# Altium footprint library PCB_V2.PcbLib: 86 footprints (part 5 of 6)
Each footprint in its own frame and in the unit in brackets; x right, y up, seen from the top. Pads: shape width x height; smd on the part's side, far side on the other; paste and mask are expansions set on the pad; w line width, h text height; cw(c..) or ccw(c..) is an arc to the next point about the centre after c.
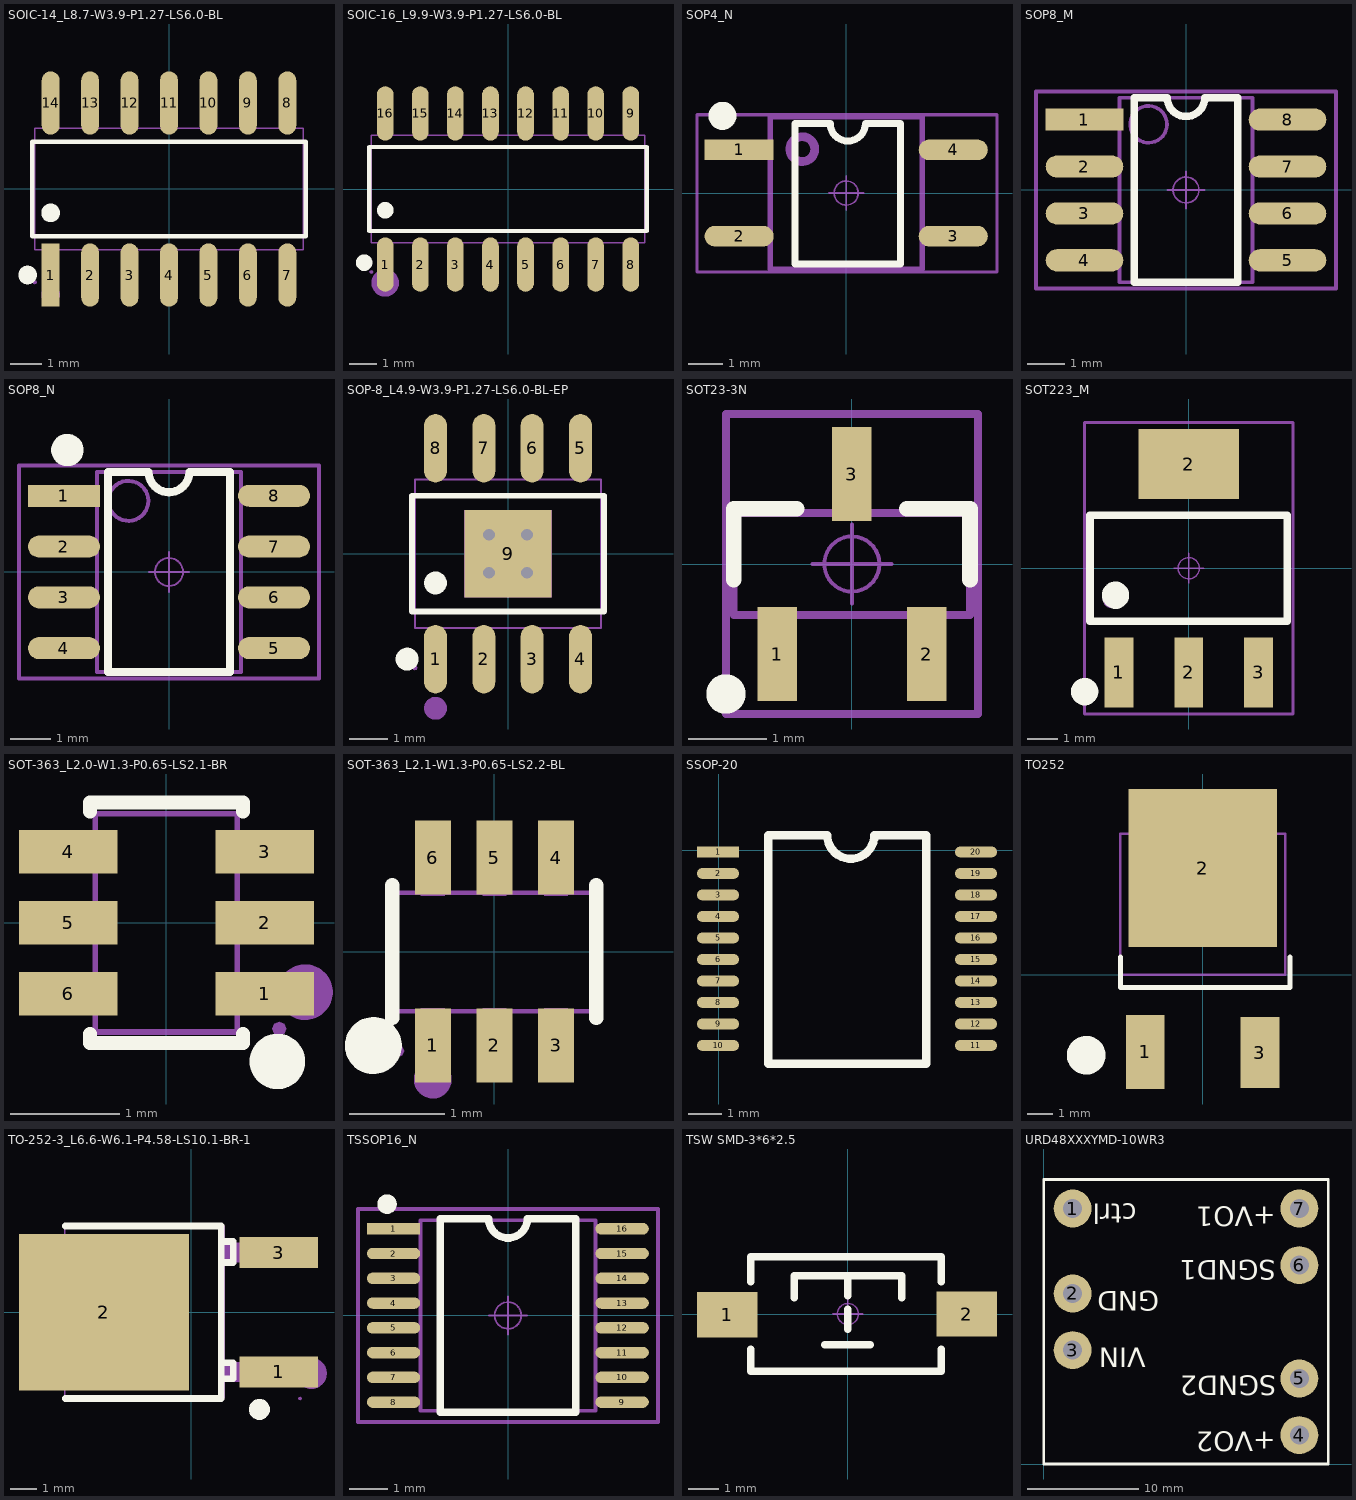
[diagram p4: the footprints below, top view; thin cyan lines are the x and y axes]

## SOIC-14_L8.7-W3.9-P1.27-LS6.0-BL [mm]
pads (14):
  rect 0.574x2.038 smd: 1(-3.81,-2.769)
  oval 0.574x2.038 smd: 2(-2.54,-2.769) 3(-1.27,-2.769) 4(0,-2.769) 5(1.27,-2.769) 6(2.54,-2.769) 7(3.81,-2.769) 8(3.81,2.769) 9(2.54,2.769) 10(1.27,2.769) 11(0,2.769) 12(-1.27,2.769) 13(-2.54,2.769) 14(-3.81,2.769)
Top Overlay:
  circle w0.3: c-3.81,-0.769 r0.15
  circle w0.3: c-4.549,-2.769 r0.15
  lines w0.152: -4.401,-1.521 -4.401,1.521 4.401,1.521 4.401,-1.521 -4.401,-1.521
Mechanical 6:
  circle w0.3: c-3.81,-3.4 r0.15
Mechanical 15:
  region: -4.261,-3 -4.279,-2.955 -4.325,-2.936 -4.371,-2.955 -4.389,-3 -4.371,-3.045 -4.325,-3.064 -4.279,-3.045
  region: -4.015,-3 -4.015,-2.165 -3.605,-2.165 -3.605,-3
  region: -4.015,-2.175 -4.015,-1.94 -3.605,-1.94 -3.605,-2.175
  region: -2.745,-3 -2.745,-2.165 -2.335,-2.165 -2.335,-3
  region: -2.745,-2.175 -2.745,-1.94 -2.335,-1.94 -2.335,-2.175
  region: -1.475,-3 -1.475,-2.165 -1.065,-2.165 -1.065,-3
  region: -1.475,-2.175 -1.475,-1.94 -1.065,-1.94 -1.065,-2.175
  region: -0.205,-3 -0.205,-2.165 0.205,-2.165 0.205,-3
  region: -0.205,-2.175 -0.205,-1.94 0.205,-1.94 0.205,-2.175
  region: 1.065,-3 1.065,-2.165 1.475,-2.165 1.475,-3
  region: 1.065,-2.175 1.065,-1.94 1.475,-1.94 1.475,-2.175
  region: 2.335,-3 2.335,-2.165 2.745,-2.165 2.745,-3
  region: 2.335,-2.175 2.335,-1.94 2.745,-1.94 2.745,-2.175
  region: 3.605,-3 3.605,-2.165 4.015,-2.165 4.015,-3
  region: 3.605,-2.175 3.605,-1.94 4.015,-1.94 4.015,-2.175
  region: -4.015,3 -4.015,2.165 -3.605,2.165 -3.605,3
  region: -4.015,2.175 -4.015,1.94 -3.605,1.94 -3.605,2.175
  region: -2.745,3 -2.745,2.165 -2.335,2.165 -2.335,3
  region: -2.745,2.175 -2.745,1.94 -2.335,1.94 -2.335,2.175
  region: -1.475,3 -1.475,2.165 -1.065,2.165 -1.065,3
  region: -1.475,2.175 -1.475,1.94 -1.065,1.94 -1.065,2.175
  region: -0.205,3 -0.205,2.165 0.205,2.165 0.205,3
  region: -0.205,2.175 -0.205,1.94 0.205,1.94 0.205,2.175
  region: 1.065,3 1.065,2.165 1.475,2.165 1.475,3
  region: 1.065,2.175 1.065,1.94 1.475,1.94 1.475,2.175
  region: 2.335,3 2.335,2.165 2.745,2.165 2.745,3
  region: 2.335,2.175 2.335,1.94 2.745,1.94 2.745,2.175
  region: 3.605,3 3.605,2.165 4.015,2.165 4.015,3
  region: 3.605,2.175 3.605,1.94 4.015,1.94 4.015,2.175
  lines w0.051: -4.325,-1.95 -4.325,1.95 4.325,1.95 4.325,-1.95 -4.325,-1.95

## SOIC-16_L9.9-W3.9-P1.27-LS6.0-BL [mm]
pads (16):
  oval 0.602x1.971 smd: 1(-4.445,-2.736) 2(-3.175,-2.736) 3(-1.905,-2.736) 4(-0.635,-2.736) 5(0.635,-2.736) 6(1.905,-2.736) 7(3.175,-2.736) 8(4.445,-2.736) 9(4.445,2.736) 10(3.175,2.736) 11(1.905,2.736) 12(0.635,2.736) 13(-0.635,2.736) 14(-1.905,2.736) 15(-3.175,2.736) 16(-4.445,2.736)
Top Overlay:
  circle w0.3: c-5.207,-2.667 r0.15
  circle w0.3: c-4.445,-0.769 r0.15
  lines w0.152: -5.026,-1.521 5.026,-1.521 5.026,1.521 -5.026,1.521 -5.026,-1.521
Mechanical 6:
  circle w0.5: c-4.445,-3.4 r0.25
Mechanical 15:
  region: 4.23,2.31 4.23,1.94 4.66,1.94 4.66,2.31
  region: 4.23,3 4.23,2.3 4.66,2.3 4.66,3
  region: 2.96,2.31 2.96,1.94 3.39,1.94 3.39,2.31
  region: 2.96,3 2.96,2.3 3.39,2.3 3.39,3
  region: 1.69,2.31 1.69,1.94 2.12,1.94 2.12,2.31
  region: 1.69,3 1.69,2.3 2.12,2.3 2.12,3
  region: 0.42,2.31 0.42,1.94 0.85,1.94 0.85,2.31
  region: 0.42,3 0.42,2.3 0.85,2.3 0.85,3
  region: -0.85,2.31 -0.85,1.94 -0.42,1.94 -0.42,2.31
  region: -0.85,3 -0.85,2.3 -0.42,2.3 -0.42,3
  region: -2.12,2.31 -2.12,1.94 -1.69,1.94 -1.69,2.31
  region: -2.12,3 -2.12,2.3 -1.69,2.3 -1.69,3
  region: -3.39,2.31 -3.39,1.94 -2.96,1.94 -2.96,2.31
  region: -3.39,3 -3.39,2.3 -2.96,2.3 -2.96,3
  region: -4.66,2.31 -4.66,1.94 -4.23,1.94 -4.23,2.31
  region: -4.66,3 -4.66,2.3 -4.23,2.3 -4.23,3
  region: 4.23,-2.31 4.23,-1.94 4.66,-1.94 4.66,-2.31
  region: 4.23,-3 4.23,-2.3 4.66,-2.3 4.66,-3
  region: 2.96,-2.31 2.96,-1.94 3.39,-1.94 3.39,-2.31
  region: 2.96,-3 2.96,-2.3 3.39,-2.3 3.39,-3
  region: 1.69,-2.31 1.69,-1.94 2.12,-1.94 2.12,-2.31
  region: 1.69,-3 1.69,-2.3 2.12,-2.3 2.12,-3
  region: 0.42,-2.31 0.42,-1.94 0.85,-1.94 0.85,-2.31
  region: 0.42,-3 0.42,-2.3 0.85,-2.3 0.85,-3
  region: -0.85,-2.31 -0.85,-1.94 -0.42,-1.94 -0.42,-2.31
  region: -0.85,-3 -0.85,-2.3 -0.42,-2.3 -0.42,-3
  region: -2.12,-2.31 -2.12,-1.94 -1.69,-1.94 -1.69,-2.31
  region: -2.12,-3 -2.12,-2.3 -1.69,-2.3 -1.69,-3
  region: -3.39,-2.31 -3.39,-1.94 -2.96,-1.94 -2.96,-2.31
  region: -3.39,-3 -3.39,-2.3 -2.96,-2.3 -2.96,-3
  region: -4.66,-2.31 -4.66,-1.94 -4.23,-1.94 -4.23,-2.31
  region: -4.66,-3 -4.66,-2.3 -4.23,-2.3 -4.23,-3
  region: -4.886,-3 -4.904,-2.955 -4.95,-2.936 -4.996,-2.955 -5.014,-3 -4.996,-3.045 -4.95,-3.064 -4.904,-3.045
  lines w0.051: -4.95,-1.95 4.95,-1.95 4.95,1.95 -4.95,1.95 -4.95,-1.95

## SOP4_N [mm] "4.4*6.8*2.1"
pads (4):
  rect 2x0.6 smd: 1(-3.1,1.25)
  oval 2x0.6 smd: 2(-3.1,-1.25) 3(3.1,-1.25) 4(3.1,1.25)
Top Overlay:
  circle w0.5: c-3.581,2.235 r0.155
  lines w0.2: -1.476,2.012 -1.476,-2.052 1.572,-2.052 1.572,2.012
  lines w0.203: -1.476,2.012 -0.46,2.012 ccw(c0.048,2.012) 0.048,1.504 ccw(c0.048,2.012) 0.556,2.012 1.572,2.012
Mechanical 13:
  circle w0.254: c-1.27,1.27 r0.359
  lines w0.15: -2.2,-2.2 -2.2,2.2 2.2,2.2 2.2,-2.2 -2.2,-2.2
Mechanical 15:
  circle w0.05: c0,0 r0.35
  lines w0.05: -0.5,0 0.5,0 ; 0,-0.5 0,0.5
  lines w0.1: -4.318,-2.286 -4.318,2.266 4.366,2.266 4.366,-2.286 -4.318,-2.286
3D body: height 1.9, standoff 0, extent -3.403,-2.15 3.403,2.15

## SOP8_M [mm] "5*6*1.8mm（?"
height 1.75
pads (8):
  rect 2.1x0.6 smd: 1(-2.75,1.905)
  oval 2.1x0.6 smd: 2(-2.75,0.635) 3(-2.75,-0.635) 4(-2.75,-1.905) 5(2.75,-1.905) 6(2.75,-0.635) 7(2.75,0.635) 8(2.75,1.905)
Top Overlay:
  lines w0.2: -1.397,2.5 -1.397,-2.5 1.397,-2.5 1.397,2.5
  lines w0.203: -1.397,2.5 -0.508,2.5 ccw(c0,2.5) 0,1.992 ccw(c0,2.5) 0.508,2.5 1.397,2.5
Mechanical 13:
  circle w0.1: c-1.016,1.778 r0.5
  lines w0.1: -1.8,-2.5 -1.8,2.5 1.8,2.5 1.8,-2.5 -1.8,-2.5
Mechanical 15:
  circle w0.05: c0,0 r0.35
  lines w0.05: -0.5,0 0.5,0 ; 0,-0.5 0,0.5
  lines w0.1: -4.064,-2.667 -4.064,2.667 4.064,2.667 4.064,-2.667 -4.064,-2.667
3D body: height 1.9, standoff 0, extent -3.003,-2.5 3.003,2.5

## SOP8_N [mm] "5*6*1"
height 1.75
pads (8):
  rect 1.8x0.55 smd: 1(-2.625,1.905)
  oval 1.8x0.55 smd: 2(-2.625,0.635) 3(-2.625,-0.635) 4(-2.625,-1.905) 5(2.625,-1.905) 6(2.625,-0.635) 7(2.625,0.635) 8(2.625,1.905)
Top Overlay:
  circle w0.5: c-2.54,3.048 r0.155
  lines w0.2: -1.524,2.5 -1.524,-2.5 1.524,-2.5 1.524,2.5
  lines w0.203: -1.524,2.5 -0.508,2.5 ccw(c0,2.5) 0,1.992 ccw(c0,2.5) 0.508,2.5 1.524,2.5
Mechanical 13:
  circle w0.1: c-1.016,1.778 r0.5
  lines w0.1: -1.8,-2.5 1.8,-2.5 1.8,2.5 -1.8,2.5 -1.8,-2.5
Mechanical 15:
  circle w0.05: c0,0 r0.35
  lines w0.05: -0.5,0 0.5,0 ; 0,-0.5 0,0.5
  lines w0.1: -3.75,-2.667 -3.75,2.667 3.75,2.667 3.75,-2.667 -3.75,-2.667
3D body: height 1.9, standoff 0, extent -3.003,-2.5 3.003,2.5

## SOP-8_L4.9-W3.9-P1.27-LS6.0-BL-EP [mm]
pads (9):
  oval 0.6x1.8 smd: 1(-1.905,-2.772) 2(-0.635,-2.772) 3(0.635,-2.772) 4(1.905,-2.772) 5(1.905,2.772) 6(0.635,2.772) 7(-0.635,2.772) 8(-1.905,2.772)
  rect 2.29x2.29 smd: 9(0,0)
via 0.5,0.5 diameter 0.61 hole 0.305
via 0.5,-0.5 diameter 0.61 hole 0.305
via -0.5,-0.5 diameter 0.61 hole 0.305
via -0.5,0.5 diameter 0.61 hole 0.305
Top Overlay:
  circle w0.3: c-2.652,-2.772 r0.15
  circle w0.3: c-1.905,-0.769 r0.15
  lines w0.152: -2.526,-1.521 2.526,-1.521 2.526,1.521 -2.526,1.521 -2.526,-1.521
Mechanical 6:
  circle w0.3: c-1.905,-4.064 r0.15
Mechanical 15:
  region: -1.145,-1.145 -1.145,1.145 1.145,1.145 1.145,-1.145
  region: 1.695,2.175 1.695,1.94 2.115,1.94 2.115,2.175
  region: 1.695,3 1.695,2.165 2.115,2.165 2.115,3
  region: 0.425,2.175 0.425,1.94 0.845,1.94 0.845,2.175
  region: 0.425,3 0.425,2.165 0.845,2.165 0.845,3
  region: -0.845,2.175 -0.845,1.94 -0.425,1.94 -0.425,2.175
  region: -0.845,3 -0.845,2.165 -0.425,2.165 -0.425,3
  region: -2.115,2.175 -2.115,1.94 -1.695,1.94 -1.695,2.175
  region: -2.115,3 -2.115,2.165 -1.695,2.165 -1.695,3
  region: 1.695,-2.175 1.695,-1.94 2.115,-1.94 2.115,-2.175
  region: 1.695,-3 1.695,-2.165 2.115,-2.165 2.115,-3
  region: 0.425,-2.175 0.425,-1.94 0.845,-1.94 0.845,-2.175
  region: 0.425,-3 0.425,-2.165 0.845,-2.165 0.845,-3
  region: -0.845,-2.175 -0.845,-1.94 -0.425,-1.94 -0.425,-2.175
  region: -0.845,-3 -0.845,-2.165 -0.425,-2.165 -0.425,-3
  region: -2.115,-2.175 -2.115,-1.94 -1.695,-1.94 -1.695,-2.175
  region: -2.115,-3 -2.115,-2.165 -1.695,-2.165 -1.695,-3
  region: -2.386,-3 -2.404,-2.955 -2.45,-2.936 -2.496,-2.955 -2.514,-3 -2.496,-3.045 -2.45,-3.064 -2.404,-3.045
  lines w0.051: -2.45,-1.95 2.45,-1.95 2.45,1.95 -2.45,1.95 -2.45,-1.95

## SOT23-3N [mm] "3x1.3x1"
height 1.1
pads (3):
  rect 0.5x1.2 smd: 1(-0.95,-1.143) 2(0.95,-1.143) 3(0,1.143)
Top Overlay:
  circle w0.25: c-1.6,-1.651 r0.125
  lines w0.2: -1.501,-0.2 -1.501,0.7 -0.701,0.7 ; 0.699,0.7 1.499,0.7 1.499,-0.2
Mechanical 13:
  lines w0.1: -1.5,-0.65 -1.5,0.65 1.5,0.65 1.5,-0.65 -1.5,-0.65
Mechanical 15:
  circle w0.05: c0,0 r0.35
  lines w0.05: -0.5,0 0.5,0 ; 0,-0.5 0,0.5
  lines w0.1: -1.6,-1.905 -1.6,1.905 1.6,1.905 1.6,-1.905 -1.6,-1.905
3D body: height 1.05, standoff 0, extent -1.5,-1.2 1.5,1.2

## SOT223_M [mm] "6.4x7x1.6"
height 1.7
pads (4):
  rect 0.95x2.3 smd: 1(-2.3,-3.429) 2(0,-3.429) 3(2.3,-3.429)
  rect 3.3x2.3 smd: 2(0,3.429)
Top Overlay:
  circle w0.5: c-2.413,-0.889 r0.2
  circle w0.5: c-3.429,-4.064 r0.2
  lines w0.25: -3.25,-1.75 -3.25,1.75 3.25,1.75 3.25,-1.75 -3.25,-1.75
Mechanical 13:
  circle w0.1: c-2.536,-1.016 r0.25
  lines w0.1: -3.25,-1.75 3.25,-1.75 3.25,1.75 -3.25,1.75 -3.25,-1.75
Mechanical 15:
  circle w0.05: c0,0 r0.35
  lines w0.05: -0.5,0 0.5,0 ; 0,-0.5 0,0.5
  lines w0.1: -3.429,-4.8 3.429,-4.8 3.429,4.8 -3.429,4.8 -3.429,-4.8
3D body: height 1.65, standoff -0.02, extent -3.25,-3.508 3.25,3.508

## SOT-363_L2.0-W1.3-P0.65-LS2.1-BR [mm]
pads (6):
  rect 0.9x0.4 smd paste+0.051: 1(0.9,-0.65) 2(0.9,0) 3(0.9,0.65) 4(-0.9,0.65) 5(-0.9,0) 6(-0.9,-0.65)
Top Overlay:
  circle w0.254: c1.016,-1.27 r0.127
  lines w0.127: -0.7,-1.018 -0.7,-1.1 0.7,-1.1 0.7,-1.018 ; -0.7,1.018 -0.7,1.1 0.7,1.1 0.7,1.018
Mechanical 2:
  circle w0.254: c1.27,-0.635 r0.127
Mechanical 6:
  lines w0.051: -0.65,-1 -0.65,1 0.65,1 0.65,-1 -0.65,-1
Mechanical 7:
  region: 0.644,0.774 0.764,0.774 0.764,0.525 0.644,0.525
  region: 0.644,0.125 0.764,0.124 0.764,-0.125 0.644,-0.125
  region: 0.644,-0.525 0.764,-0.526 0.764,-0.775 0.644,-0.775
  region: -0.644,-0.774 -0.764,-0.774 -0.764,-0.525 -0.644,-0.525
  region: -0.644,-0.124 -0.764,-0.124 -0.764,0.125 -0.644,0.125
  region: -0.644,0.526 -0.764,0.526 -0.764,0.775 -0.644,0.775
Mechanical 8:
  region: 1.097,-0.97 1.078,-1.016 1.032,-1.035 0.986,-1.016 0.967,-0.97 0.986,-0.924 1.032,-0.905 1.078,-0.924
Mechanical 9:
  region: 0.762,0.775 1.062,0.775 1.062,0.525 0.762,0.525
  region: 0.762,0.125 1.062,0.125 1.062,-0.125 0.762,-0.125
  region: 0.762,-0.525 1.062,-0.525 1.062,-0.775 0.762,-0.775
  region: -0.762,-0.775 -1.062,-0.775 -1.062,-0.525 -0.762,-0.525
  region: -0.762,-0.125 -1.062,-0.125 -1.062,0.125 -0.762,0.125
  region: -0.762,0.525 -1.062,0.525 -1.062,0.775 -0.762,0.775

## SOT-363_L2.1-W1.3-P0.65-LS2.2-BL [mm]
pads (6):
  rect 0.38x0.78 smd: 1(-0.65,-0.99) 2(0,-0.99) 3(0.65,-0.99) 4(0.65,0.99) 5(0,0.99) 6(-0.65,0.99)
Top Overlay:
  circle w0.3: c-1.277,-0.992 r0.15
  lines w0.152: -1.076,-0.701 -1.076,0.701 ; 1.076,-0.701 1.076,0.701
Mechanical 6:
  circle w0.2: c-0.65,-1.35 r0.1
Mechanical 15:
  region: -0.952,-1.05 -0.97,-1.005 -1.016,-0.986 -1.062,-1.005 -1.08,-1.05 -1.062,-1.095 -1.016,-1.114 -0.97,-1.095
  region: -0.775,-0.756 -0.775,-0.596 -0.525,-0.596 -0.525,-0.756
  region: -0.775,-1.106 -0.775,-0.746 -0.525,-0.746 -0.525,-1.106
  region: -0.125,-0.756 -0.125,-0.596 0.125,-0.596 0.125,-0.756
  region: -0.125,-1.106 -0.125,-0.746 0.125,-0.746 0.125,-1.106
  region: 0.525,-0.756 0.525,-0.596 0.775,-0.596 0.775,-0.756
  region: 0.525,-1.106 0.525,-0.746 0.775,-0.746 0.775,-1.106
  region: 0.525,0.59 0.525,0.75 0.775,0.75 0.775,0.59
  region: 0.525,0.74 0.525,1.1 0.775,1.1 0.775,0.74
  region: -0.125,0.59 -0.125,0.75 0.125,0.75 0.125,0.59
  region: -0.125,0.74 -0.125,1.1 0.125,1.1 0.125,0.74
  region: -0.775,0.59 -0.775,0.75 -0.525,0.75 -0.525,0.59
  region: -0.775,0.74 -0.775,1.1 -0.525,1.1 -0.525,0.74
  lines w0.051: -1.053,-0.63 -1.053,0.62 1.047,0.62 1.047,-0.63 -1.053,-0.63

## SSOP-20 [mm]
pads (20):
  rect 1.27x0.33 smd: 1(-0.025,-0.051)
  oval 1.27x0.33 smd: 2(-0.025,-0.701) 3(-0.025,-1.351) 4(-0.025,-2.001) 5(-0.025,-2.651) 6(-0.025,-3.301) 7(-0.025,-3.951) 8(-0.025,-4.601) 9(-0.025,-5.251) 10(-0.025,-5.901) 11(7.775,-5.901) 12(7.775,-5.251) 13(7.775,-4.601) 14(7.775,-3.951) 15(7.775,-3.301) 16(7.775,-2.651) 17(7.775,-2.001) 18(7.775,-1.351) 19(7.775,-0.701) 20(7.775,-0.051)
Top Overlay:
  lines w0.254: 6.223,-6.45 1.499,-6.45 1.499,0.449 3.269,0.449 3.277,0.457 ccw(c3.99,0.457) 4.703,0.457 6.266,0.457 6.274,0.449 6.274,-6.45

## TO252 [mil]
pads (3):
  rect 60x115 smd: 1(-89.55,-119.77)
  rect 230x245 smd: 2(0,165.35)
  rect 60x110 smd: 3(88.45,-120.77)
Top Overlay:
  circle w30: c-180.86,-125 r15
  lines w7.87: -127.95,27.56 -127.95,-20 135,-20 135,27.56
Mechanical 15:
  lines w3.94: -105.04,218.5 -105.04,236.06 -65.59,271.65 65.59,271.65 105.04,236.06 105.04,218.5 ; -127.95,0 127.95,0 127.95,218.5 -127.95,218.5 -127.95,0
3D body: height 90.55, standoff -0.2, extent -126.95,-120.28 128.95,250.56

## TO-252-3_L6.6-W6.1-P4.58-LS10.1-BR-1 [mm]
pads (3):
  rect 3x1.2 smd: 1(3.343,-2.285) 3(3.343,2.285)
  rect 6.5x6 smd: 2(-3.343,0)
Top Overlay:
  lines w0.254: -4.826,-3.302 1.143,-3.302 1.143,3.302 -4.826,3.302 ; 1.143,-2.54 1.611,-2.54 1.611,-1.936 1.143,-1.936 ; 1.143,1.905 1.611,1.905 1.611,2.706 1.143,2.706
  lines w0.4: 2.607,-3.52 ccw(c2.608,-3.72) 2.608,-3.92 ccw(c2.608,-3.72) 2.609,-3.52
Mechanical 6:
  circle w0.6: c4.588,-2.34 r0.3
Mechanical 15:
  region: 2.868,1.905 2.868,2.665 4.168,2.665 4.168,1.905
  region: 1.258,1.905 1.258,2.665 2.878,2.665 2.878,1.905
  region: 2.868,-2.665 2.868,-1.905 4.168,-1.905 4.168,-2.665
  region: 1.258,-2.665 1.258,-1.905 2.878,-1.905 2.878,-2.665
  region: -5.932,-2.645 -5.932,2.645 -0.432,2.645 -0.432,-2.645
  region: 4.233,-3.3 4.214,-3.254 4.168,-3.235 4.122,-3.254 4.103,-3.3 4.122,-3.346 4.168,-3.365 4.214,-3.346 4.233,-3.3
  lines w0.051: -4.833,-3.3 1.268,-3.3 1.268,3.3 -4.833,3.3 -4.833,-3.3

## TSSOP16_N [mm] "5*6.4*1mm（长宽"
pads (16):
  rect 1.4x0.3 smd: 1(-3.004,2.275)
  oval 1.4x0.3 smd: 2(-3.004,1.625) 3(-3.004,0.975) 4(-3.004,0.325) 5(-3.004,-0.325) 6(-3.004,-0.975) 7(-3.004,-1.625) 8(-3.004,-2.275) 9(2.996,-2.275) 10(2.996,-1.625) 11(2.996,-0.975) 12(2.996,-0.325) 13(2.996,0.325) 14(2.996,0.975) 15(2.996,1.625) 16(2.996,2.275)
Top Overlay:
  circle w0.254: c-3.175,2.921 r0.13
  lines w0.2: -1.778,-2.54 1.778,-2.54 1.778,2.54 0.508,2.54 cw(c0,2.54) -0.508,2.54 -1.778,2.54 -1.778,-2.54
Mechanical 13:
  lines w0.1: -2.3,-2.5 2.3,-2.5 2.3,2.5 -2.3,2.5 -2.3,-2.5
Mechanical 15:
  circle w0.05: c0,0 r0.35
  lines w0.05: -0.5,0 0.5,0 ; 0,-0.5 0,0.5
  lines w0.1: -3.937,-2.794 -3.937,2.794 3.937,2.794 3.937,-2.794 -3.937,-2.794
3D body: height 1.03, standoff -0.02, extent -3.202,-2.5 3.202,2.5

## TSW SMD-3*6*2.5 [mm]
pads (2):
  rect 2x1.5 smd: 1(-3.996,-0.02) 2(3.937,0)
Top Overlay:
  lines w0.254: -3.212,-1.168 -3.212,-1.9 3.088,-1.9 3.088,-1.168 ; -3.212,1.067 -3.212,1.9 3.088,1.9 3.088,1.067 ; -1.778,0.533 -1.778,1.27 1.778,1.27 1.778,0.533 ; -0.762,-1.016 0.737,-1.016 ; 0,-0.508 0,0.152 ; 0,0.61 0,1.27
Mechanical 15:
  circle w0.05: c0,0 r0.35
  lines w0.05: -0.5,0 0.5,0 ; 0,-0.5 0,0.5
3D body: height 2.59, standoff -0.03, extent -4,-1.877 4,1.623

## URD48XXXYMD-10WR3 [mm]
height 11.7
pads (7):
  round 3.4 hole 1.7: 1(2.59,22.91) 2(2.59,15.29) 3(2.59,10.21) 4(22.91,2.59) 5(22.91,7.67) 6(22.91,17.83) 7(22.91,22.91)
Top Overlay:
  lines w0.254: 0,0 0,25.5 25.5,25.5 25.5,0 0,0
  text "+VO1" at 20.777,23.673 h3
  text "SGND1" at 20.777,18.847 h3
  text "SGND2" at 20.828,8.509 h3
  text "+VO2" at 20.777,3.48 h3
  text "VIN" at 9.144,11.024 h3
  text "GND" at 10.363,16.078 h3
  text "ctrl" at 8.331,23.901 h3